# Altium schematic symbol library MIC29300-12WU-TR.SchLib: 1 symbol
Pins are listed as number, name and electrical type; pins without a type are passive.

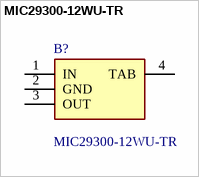
[diagram p0: symbol MIC29300-12WU-TR]

## MIC29300-12WU-TR
designator B?
LDO Voltage Regulators; Manufacturer_Name: Microchip; Geometry.Height: 4.597mm; Mouser Part Number: 998-MIC29300-12WUTR; Mouser Price/Stock: https://www.mouser.co.uk/ProductDetail/Microchip-Technology/MIC29300-12WU-TR?qs=U6T8BxXiZAUm3rpKH4l03A%3D%3D; Manufacturer_Part_Number: MIC29300-12WU-TR; Datasheet Link: http://www.microchip.com/mymicrochip/filehandler.aspx?ddocname=en580805
footprint MIC2930012WUTR
pins: 1 IN, 2 GND, 3 OUT, 4 TAB